# Altium footprint library PMP23468.PcbLib: 24 footprints (part 1 of 2)
Each footprint in its own frame and in the unit in brackets; x right, y up, seen from the top. Pads: shape width x height; smd on the part's side, far side on the other; paste and mask are expansions set on the pad; w line width, h text height; cw(c..) or ccw(c..) is an arc to the next point about the centre after c.
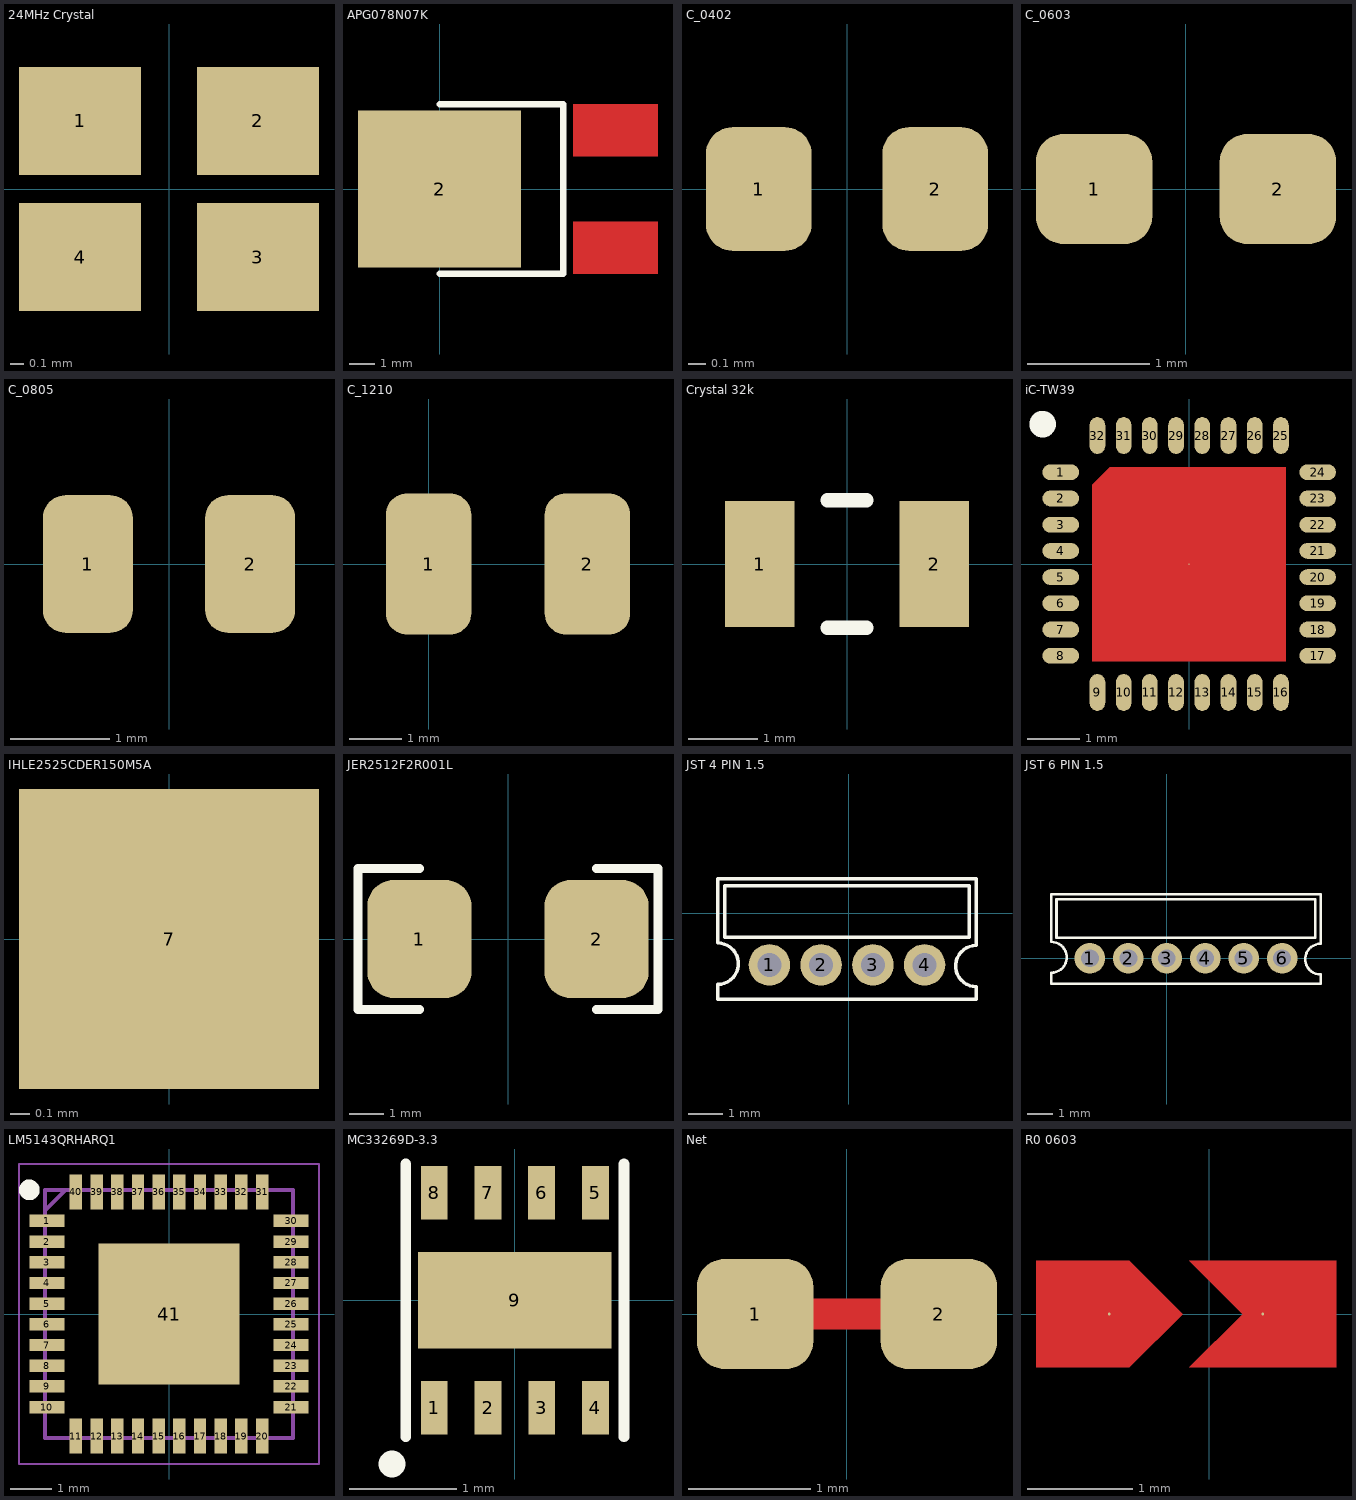
[diagram p0: the footprints below, top view; thin cyan lines are the x and y axes]

## 24MHz Crystal [mm]
pads (4):
  rect 0.88x0.78 smd: 1(-0.64,0.49) 2(0.64,0.49) 3(0.64,-0.49) 4(-0.64,-0.49)

## APG078N07K [mil] "70V 80A 6.7mO@10V,30A 45W 3V@250uA 1PCSNChannel TO-252-2  MOSFETs ROHS"
pads (3):
  round 1 smd: 1(270,-90) 3(270,90)
  rect 250x240 smd: 2(0,0)
Top Layer:
  region: 205,-130 205,-50 335,-50 335,-130
  region: 205,130 205,50 335,50 335,130
Top Overlay:
  lines w10: 0,-130 190,-130 190,130 0,130
3D body "to252-2_p4-57_l6-73_w7-36.stp": height 93.7, standoff -0.39, extent -102.32,-132.48 302.4,132.48

## C_0402 [mm]
pads (2):
  rrect50% 0.6x0.7 smd mask+0.102: 1(-0.5,0) 2(0.5,0)
3D body "RESC1005X35L_BROWN.step": height 0.35, standoff 0, extent -0.5,-0.25 0.5,0.25

## C_0603 [mm]
pads (2):
  rrect50% 0.95x0.9 smd mask+0.102: 1(-0.75,0) 2(0.75,0)
3D body "Ceramic_Capacitor_0603_h32mil.step": height 0.81, standoff 0.01, extent -0.8,-0.4 0.8,0.4

## C_0805 [mm]
pads (2):
  rrect50% 0.91x1.39 smd: 1(-0.82,0) 2(0.82,0)
3D body "CL21B104KCFNNNE.stp": height 1.35, standoff 0, extent -1,-0.625 1,0.625

## C_1210 [mm]
pads (2):
  rrect50% 1.635x2.7 smd mask+0.102: 1(0,0) 2(3.035,0)
3D body "CAP1210.STEP": height 1.5, standoff 0, extent -0.235,-1.287 3.165,1.313

## Crystal 32k [mm]
pads (2):
  rect 1x1.8 smd: 1(-1.25,0) 2(1.25,0)
Top Overlay:
  lines w0.203: -0.279,-0.914 0.279,-0.914 ; -0.279,0.914 0.279,0.914
3D body "ABS07-120.STEP": height 0.89, standoff 0, extent -1.628,-0.752 1.577,0.752

## iC-TW39 [mm] "24-BIT MAGNETIC ON-AXIS ANGLE SENSOR"
pads (33):
  oval 0.7x0.3 smd: 1(-2.45,1.75) 2(-2.45,1.25) 3(-2.45,0.75) 4(-2.45,0.25) 5(-2.45,-0.25) 6(-2.45,-0.75) 7(-2.45,-1.25) 8(-2.45,-1.75) 17(2.45,-1.75) 18(2.45,-1.25) 19(2.45,-0.75) 20(2.45,-0.25) 21(2.45,0.25) 22(2.45,0.75) 23(2.45,1.25) 24(2.45,1.75)
  oval 0.3x0.7 smd: 9(-1.75,-2.45) 10(-1.25,-2.45) 11(-0.75,-2.45) 12(-0.25,-2.45) 13(0.25,-2.45) 14(0.75,-2.45) 15(1.25,-2.45) 16(1.75,-2.45) 25(1.75,2.45) 26(1.25,2.45) 27(0.75,2.45) 28(0.25,2.45) 29(-0.25,2.45) 30(-0.75,2.45) 31(-1.25,2.45) 32(-1.75,2.45)
  round 0.025 smd: EPAD(-0.003,-0.002)
Top Layer:
  region: -1.852,-1.854 -1.852,1.516 -1.519,1.849 1.846,1.849 1.846,-1.854
Top Overlay:
  circle w0.254: c-2.794,2.667 r0.127
3D body: height 0.25, standoff 0, extent -2.794,-2.794 2.794,2.794

## IHLE2525CDER150M5A [mil] "Power Inductors - SMD 15uH 20% e-field Shield"
pads (1):
  rect 60x60 smd: 7(0,0)

## JER2512F2R001L [mm]
pads (2):
  rrect50% 3x3.4 smd: 1(-2.55,0) 2(2.55,0)
Top Overlay:
  lines w0.254: -2.54,-2.032 -4.318,-2.032 -4.318,2.032 -2.54,2.032 ; 2.54,-2.032 4.318,-2.032 4.318,2.032 2.54,2.032

## JST 4 PIN 1.5 [mm]
pads (4):
  round 1.2 hole 0.7: 1(-2.3,-1.5) 2(-0.8,-1.5) 3(0.7,-1.5) 4(2.2,-1.5)
Top Overlay:
  lines w0.1: -3.8,-2.5 3.7,-2.5 3.7,-2.134 cw(c3.7,-1.534) 3.7,-0.934 3.7,1 2.2,1 -3.8,1 -3.8,-0.866 cw(c-3.8,-1.466) -3.8,-2.066 -3.8,-2.5 ; -3.6,-0.7 3.5,-0.7 3.5,0.8 -3.6,0.8 -3.6,-0.7

## JST 6 PIN 1.5 [mm]
pads (6):
  round 1.2 hole 0.7: 1(-3,0) 2(-1.5,0) 3(0,0) 4(1.5,0) 5(3,0) 6(4.5,0)
Top Overlay:
  lines w0.1: -4.5,-1 3,-1 4.5,-1 6,-1 6,-0.634 cw(c6,-0.034) 6,0.566 6,2.5 4.5,2.5 3,2.5 1.5,2.5 -4.5,2.5 -4.5,0.634 cw(c-4.5,0.034) -4.5,-0.566 -4.5,-1 ; -4.3,0.8 5.798,0.8 5.798,2.3 -4.3,2.3 -4.3,0.8

## LM5143QRHARQ1 [mm] "40A 600mV~55V 3.5V~65V VQFN(RHA)-40  DC-DC Converters ROHS"
pads (41):
  rect 0.85x0.3 smd: 1(-2.95,2.25) 2(-2.95,1.75) 3(-2.95,1.25) 4(-2.95,0.75) 5(-2.95,0.25) 6(-2.95,-0.25) 7(-2.95,-0.75) 8(-2.95,-1.25) 9(-2.95,-1.75) 10(-2.95,-2.25) 21(2.95,-2.25) 22(2.95,-1.75) 23(2.95,-1.25) 24(2.95,-0.75) 25(2.95,-0.25) 26(2.95,0.25) 27(2.95,0.75) 28(2.95,1.25) 29(2.95,1.75) 30(2.95,2.25)
  rect 0.3x0.85 smd: 11(-2.25,-2.95) 12(-1.75,-2.95) 13(-1.25,-2.95) 14(-0.75,-2.95) 15(-0.25,-2.95) 16(0.25,-2.95) 17(0.75,-2.95) 18(1.25,-2.95) 19(1.75,-2.95) 20(2.25,-2.95) 31(2.25,2.95) 32(1.75,2.95) 33(1.25,2.95) 34(0.75,2.95) 35(0.25,2.95) 36(-0.25,2.95) 37(-0.75,2.95) 38(-1.25,2.95) 39(-1.75,2.95) 40(-2.25,2.95)
  rect 3.4x3.4 smd: 41(0,0)
Top Overlay:
  circle w0.25: c-3.375,3 r0.125
Mechanical 13:
  lines w0.1: -3,2.5 -2.5,3 ; -3,-3 3,-3 3,3 -3,3 -3,-3
Mechanical 15:
  lines w0.05: -3.625,-3.625 3.625,-3.625 3.625,3.625 -3.625,3.625 -3.625,-3.625
3D body "LM5143QRHARQ1.stp": height 1, standoff 0, extent -3.05,-3.05 3.05,3.05

## MC33269D-3.3 [mm]
pads (9):
  rect 0.25x0.5 smd: 1(-0.751,-1.001) 2(-0.249,-1.001) 3(0.251,-1.001) 4(0.75,-1.001) 5(0.751,1.001) 6(0.249,1.001) 7(-0.251,1.001) 8(-0.75,1.001)
  rect 1.8x0.9 smd: 9(0,0)
Top Overlay:
  circle w0.254: c-1.143,-1.524 r0
  lines w0.1: -1.016,-1.27 -1.016,1.27 ; 1.016,-1.27 1.016,1.27

## Net [mm]
pads (2):
  rrect50% 0.95x0.9 smd mask+0.102: 1(-0.75,0) 2(0.75,0)
Top Layer:
  rectangle: -0.508,-0.127 0.508,0.127

## R0 0603 [mil]
pads (2):
  round 1 smd: 1(-37.5,0) 2(20,0)
Top Layer:
  region: -7.5,20 12.5,0 -7.5,-20 47.5,-20 47.5,20
  region: -65,20 -30,20 -10,0 -30,-20 -65,-20